# Altium integrated library INA181A2IDBVR.IntLib: 1 symbol
Pins are listed as number, name and electrical type; pins without a type are passive.

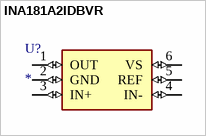
[diagram p0: symbol INA181A2IDBVR]

## INA181A2IDBVR
designator U?
26-VÂ bi-directionalÂ 350-kHz current-sense amplifier; MF: Texas Instruments; MP: INA181A2IDBVR; SnapEDA_Link: https://www.snapeda.com/parts/INA181A2IDBVR/Texas+Instruments/view-part/?ref=snap; Package: SOT-23-6 Texas Instruments; Value: *; Check_prices: https://www.snapeda.com/parts/INA181A2IDBVR/Texas+Instruments/view-part/?ref=eda
footprint SOT95P280X145-6N
pins: 1 OUT (io), 2 GND (io), 3 IN+ (io), 4 IN- (io), 5 REF (io), 6 VS (io)